# Altium footprint library TMDE_REV1.0.PcbLib: 94 footprints (part 5 of 6)
Each footprint in its own frame and in the unit in brackets; x right, y up, seen from the top. Pads: shape width x height; smd on the part's side, far side on the other; paste and mask are expansions set on the pad; w line width, h text height; cw(c..) or ccw(c..) is an arc to the next point about the centre after c.
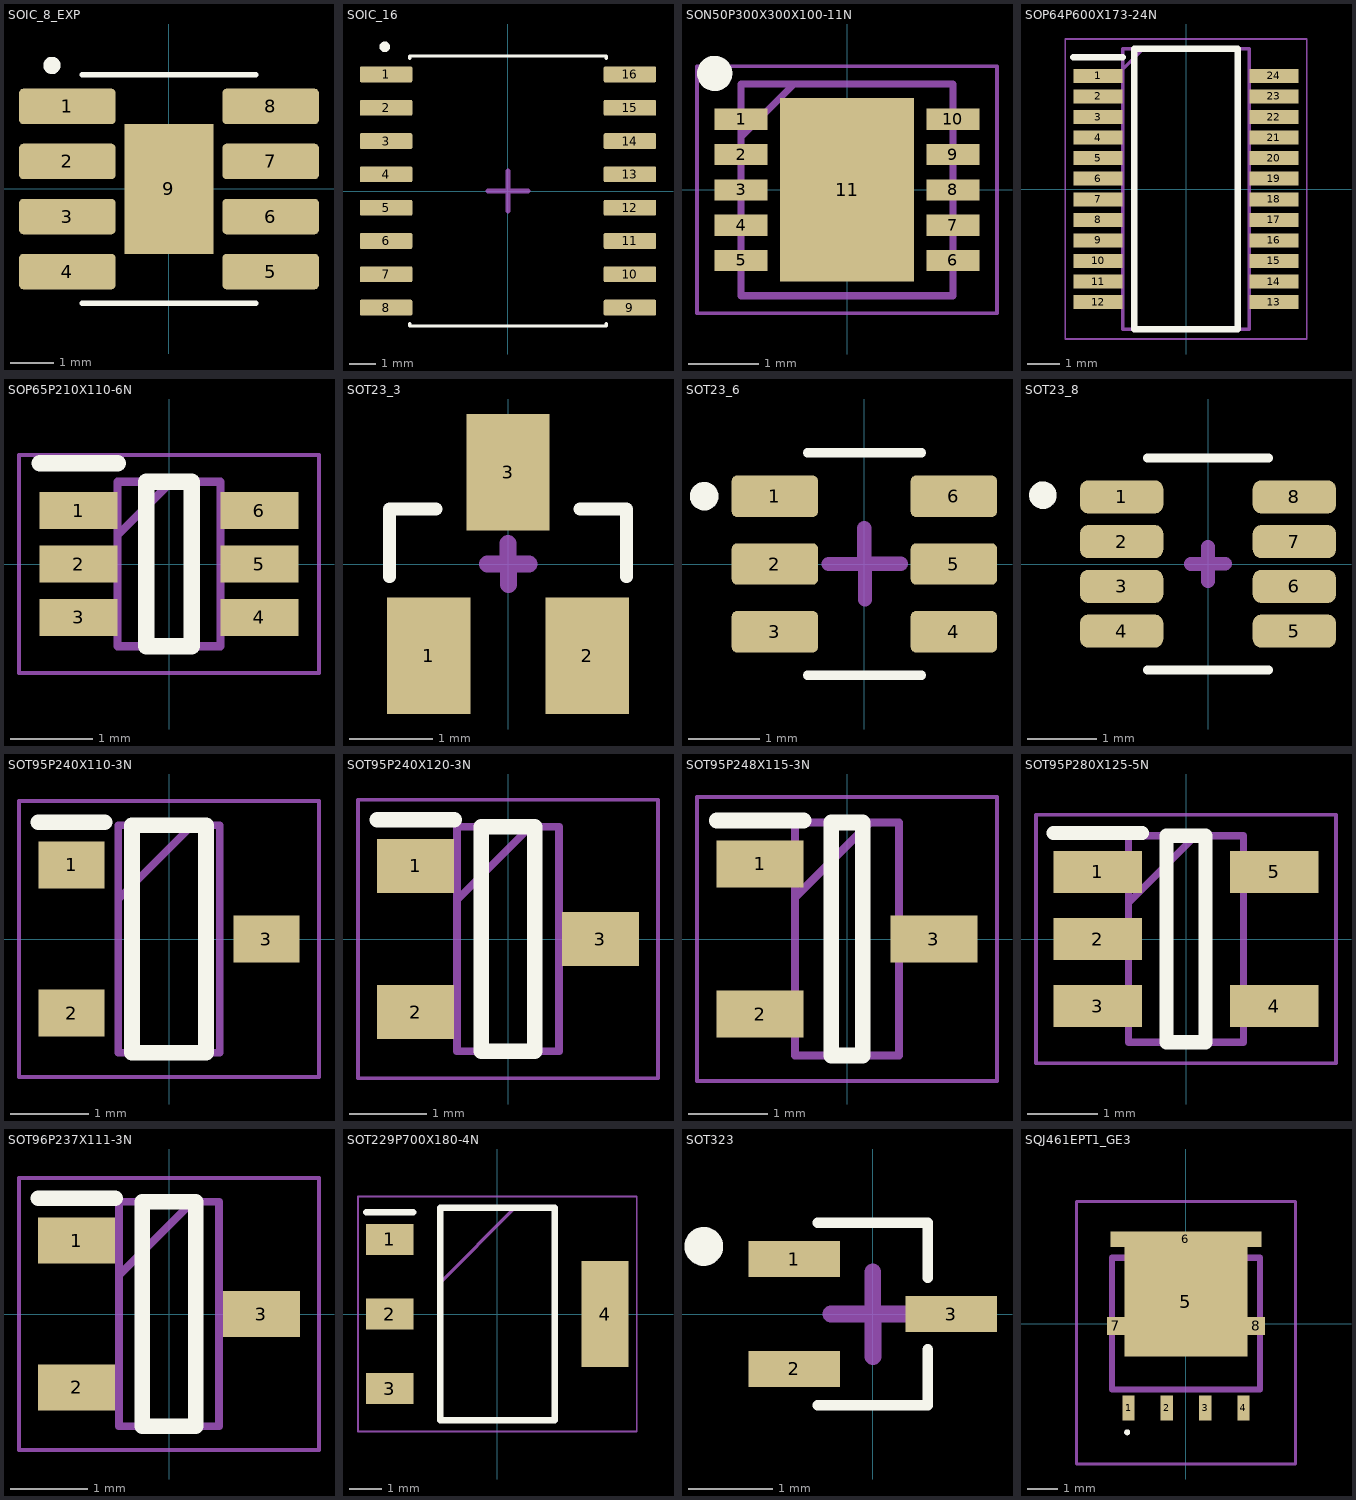
[diagram p4: the footprints below, top view; thin cyan lines are the x and y axes]

## SOIC_8_EXP [mm]
pads (9):
  rrect25% 2.23x0.82 smd: 1(-2.345,1.905) 2(-2.345,0.635) 3(-2.345,-0.635) 4(-2.345,-1.905) 5(2.345,-1.905) 6(2.345,-0.635) 7(2.345,0.635) 8(2.345,1.905)
  rect 2.06x3 smd paste-3: 9(0,0)
Top Overlay:
  circle w0.2: c-2.7,2.85 r0.1
  lines w0.127: -2,-2.635 2,-2.635 ; -2,2.635 2,2.635
Top Paste:
  region: 0.515,-0.75 -0.515,-0.75 -0.515,0.75 0.515,0.75
Mechanical 16:
  lines w0.254: -0.651,-0.007 -0.016,-0.007 -0.016,-0.642 ; -0.016,0.018 0.619,0.018 ; 0,0 0,0.635
3D body "IC8_AP64351SP-13_DIO.step": height 1.63, standoff -0.05, extent -3.073,-2.476 3.027,2.476

## SOIC_16 [mm]
pads (16):
  rrect17% 2x0.6 smd mask+0: 1(-4.65,4.445) 2(-4.65,3.175) 3(-4.65,1.905) 4(-4.65,0.635) 5(-4.65,-0.635) 6(-4.65,-1.905) 7(-4.65,-3.175) 8(-4.65,-4.445) 9(4.65,-4.445) 10(4.65,-3.175) 11(4.65,-1.905) 12(4.65,-0.635) 13(4.65,0.635) 14(4.65,1.905) 15(4.65,3.175) 16(4.65,4.445)
Top Overlay:
  circle w0.2: c-4.7,5.5 r0.1
  lines w0.127: -3.75,-5.065 -3.75,-5.15 3.75,-5.15 3.75,-5.065 ; -3.75,5.065 -3.75,5.15 3.75,5.15 3.75,5.065
Top Solder:
  drawing of 16 lines, arcs and shapes, not listed
Mechanical 16:
  lines w0.2: -0.75,0 0,0 ; 0,-0.75 0,0 ; 0,0.75 0,0 ; 0.75,0 0,0
3D body "step_temp.STEP": height 2.65, standoff 0, extent -5.15,-5.15 5.15,5.15

## SON50P300X300X100-11N [mm]
pads (11):
  rect 0.75x0.3 smd: 1(-1.5,1) 2(-1.5,0.5) 3(-1.5,0) 4(-1.5,-0.5) 5(-1.5,-1) 6(1.5,-1) 7(1.5,-0.5) 8(1.5,0) 9(1.5,0.5) 10(1.5,1)
  rect 1.9x2.6 smd: 11(0,0)
Top Overlay:
  circle w0.25: c-1.875,1.65 r0.125
Mechanical 13:
  lines w0.1: -1.5,0.75 -0.75,1.5 ; -1.5,-1.5 -1.5,1.5 1.5,1.5 1.5,-1.5 -1.5,-1.5
Mechanical 15:
  lines w0.05: -2.125,-1.75 -2.125,1.75 2.125,1.75 2.125,-1.75 -2.125,-1.75
3D body "NCP59744MN1ADJTBG.stp": height 1, standoff 0, extent -1.55,-1.5 1.55,1.5

## SOP64P600X173-24N [mm]
pads (24):
  rect 1.522x0.435 smd: 1(-2.714,3.492) 2(-2.714,2.858) 3(-2.714,2.222) 4(-2.714,1.588) 5(-2.714,0.952) 6(-2.714,0.318) 7(-2.714,-0.318) 8(-2.714,-0.952) 9(-2.714,-1.588) 10(-2.714,-2.222) 11(-2.714,-2.858) 12(-2.714,-3.492) 13(2.714,-3.492) 14(2.714,-2.858) 15(2.714,-2.222) 16(2.714,-1.588) 17(2.714,-0.952) 18(2.714,-0.318) 19(2.714,0.318) 20(2.714,0.952) 21(2.714,1.588) 22(2.714,2.222) 23(2.714,2.858) 24(2.714,3.492)
Top Overlay:
  lines w0.2: -3.475,4.06 -1.952,4.06 ; -1.602,-4.33 -1.602,4.33 1.602,4.33 1.602,-4.33 -1.602,-4.33
Mechanical 13:
  lines w0.1: -1.952,3.695 -1.318,4.33 ; -1.952,-4.33 -1.952,4.33 1.952,4.33 1.952,-4.33 -1.952,-4.33
Mechanical 15:
  lines w0.05: -3.725,-4.63 -3.725,4.63 3.725,4.63 3.725,-4.63 -3.725,-4.63
3D body "STP16CP05PTR.stp": height 1.73, standoff 0, extent -3,-4.33 3,4.33

## SOP65P210X110-6N [mm]
pads (6):
  rect 0.95x0.45 smd: 1(-1.1,0.65) 2(-1.1,0) 3(-1.1,-0.65) 4(1.1,-0.65) 5(1.1,0) 6(1.1,0.65)
Top Overlay:
  lines w0.2: -1.575,1.225 -0.625,1.225 ; -0.275,-1 0.275,-1 0.275,1 -0.275,1 -0.275,-1
Mechanical 13:
  lines w0.1: -0.625,0.35 0.025,1 ; -0.625,-1 0.625,-1 0.625,1 -0.625,1 -0.625,-1
Mechanical 15:
  lines w0.05: -1.825,-1.325 1.825,-1.325 1.825,1.325 -1.825,1.325 -1.825,-1.325
3D body "LM66100DCKR.stp": height 1, standoff 0, extent -1.05,-1 1.05,1

## SOT23_3 [mm]
pads (3):
  rect 1x1.4 smd: 1(-0.95,-1.1) 2(0.95,-1.1) 3(0,1.1)
Top Overlay:
  lines w0.152: -1.422,-0.152 -1.422,0.66 -0.864,0.66 ; 0.864,0.66 1.422,0.66 1.422,-0.152
Mechanical 16:
  lines w0.2: -0.25,0 0,0 0,0.25 ; 0.003,0.001 0.253,0.001 ; 0.006,-0.249 0.006,0.001
3D body "PESD5V0U2BT,215.STEP": height 1.1, standoff 0, extent -1.45,-1.3 1.45,1

## SOT23_6 [mm]
pads (6):
  rrect25% 1.21x0.58 smd: 1(-1.255,0.95) 2(-1.255,0) 3(-1.255,-0.95) 4(1.255,-0.95) 5(1.255,0) 6(1.255,0.95)
Top Overlay:
  circle w0.2: c-2.247,0.951 r0.1
  lines w0.127: -0.8,-1.56 0.8,-1.56 ; -0.8,1.56 0.8,1.56
Mechanical 16:
  lines w0.2: -0.5,0 0,0 0,0.5 ; 0.011,-0.496 0.011,0.004 0.511,0.004
3D body "step_temp.STEP": height 1.1, standoff 0, extent -1.375,-1.5 1.375,1.5

## SOT23_8 [mm]
pads (8):
  rrect50% 1.21x0.48 smd: 1(-1.255,0.975) 2(-1.255,0.325) 3(-1.255,-0.325) 4(-1.255,-0.975) 5(1.255,-0.975) 6(1.255,-0.325) 7(1.255,0.325) 8(1.255,0.975)
Top Overlay:
  circle w0.2: c-2.4,1 r0.1
  lines w0.127: -0.88,-1.54 0.88,-1.54 ; -0.88,1.54 0.88,1.54
Mechanical 16:
  lines w0.2: -0.25,-0.001 0,-0.001 0,0.25 ; 0,-0.248 0,0.002 ; 0,0.005 0.25,0.005
3D body "TLV3502AIDCNR.STEP": height 1.45, standoff 0, extent -1.45,-1.45 1.35,1.45

## SOT95P240X110-3N [mm]
pads (3):
  rect 0.85x0.6 smd: 1(-1.25,0.95) 2(-1.25,-0.95) 3(1.25,0)
Top Overlay:
  lines w0.2: -1.675,1.5 -0.825,1.5 ; -0.475,-1.46 0.475,-1.46 0.475,1.46 -0.475,1.46 -0.475,-1.46
Mechanical 13:
  lines w0.1: -0.65,0.51 0.3,1.46 ; -0.65,-1.46 0.65,-1.46 0.65,1.46 -0.65,1.46 -0.65,-1.46
Mechanical 15:
  lines w0.05: -1.925,-1.77 1.925,-1.77 1.925,1.77 -1.925,1.77 -1.925,-1.77
3D body "BZX84B18.stp": height 1, standoff 0, extent -1.2,-1.46 1.2,1.46

## SOT95P240X120-3N [mm]
pads (3):
  rect 1x0.7 smd: 1(-1.2,0.95) 2(-1.2,-0.95) 3(1.2,0)
Top Overlay:
  lines w0.2: -1.7,1.55 -0.7,1.55 ; -0.35,-1.46 0.35,-1.46 0.35,1.46 -0.35,1.46 -0.35,-1.46
Mechanical 13:
  lines w0.1: -0.662,0.51 0.288,1.46 ; -0.662,-1.46 0.662,-1.46 0.662,1.46 -0.662,1.46 -0.662,-1.46
Mechanical 15:
  lines w0.05: -1.95,-1.81 1.95,-1.81 1.95,1.81 -1.95,1.81 -1.95,-1.81
3D body "BZX84C15.stp": height 1.2, standoff 0, extent -1.2,-1.46 1.2,1.46

## SOT95P248X115-3N [mm]
pads (3):
  rect 1.1x0.6 smd: 1(-1.1,0.95) 2(-1.1,-0.95) 3(1.1,0)
Top Overlay:
  lines w0.2: -1.65,1.5 -0.55,1.5 ; -0.2,-1.475 0.2,-1.475 0.2,1.475 -0.2,1.475 -0.2,-1.475
Mechanical 13:
  lines w0.1: -0.658,0.525 0.292,1.475 ; -0.658,-1.475 0.658,-1.475 0.658,1.475 -0.658,1.475 -0.658,-1.475
Mechanical 15:
  lines w0.05: -1.9,-1.8 1.9,-1.8 1.9,1.8 -1.9,1.8 -1.9,-1.8
3D body "BZX84B9V1-E3-08.stp": height 1.15, standoff 0, extent -1.238,-1.475 1.238,1.475

## SOT95P280X125-5N [mm]
pads (5):
  rect 1.25x0.6 smd: 1(-1.25,0.95) 2(-1.25,0) 3(-1.25,-0.95) 4(1.25,-0.95) 5(1.25,0.95)
Top Overlay:
  lines w0.2: -1.875,1.5 -0.625,1.5 ; -0.275,-1.463 0.275,-1.463 0.275,1.463 -0.275,1.463 -0.275,-1.463
Mechanical 13:
  lines w0.1: -0.813,0.513 0.137,1.463 ; -0.813,-1.463 0.813,-1.463 0.813,1.463 -0.813,1.463 -0.813,-1.463
Mechanical 15:
  lines w0.05: -2.125,-1.763 2.125,-1.763 2.125,1.763 -2.125,1.763 -2.125,-1.763
3D body "DIO7002AST5.stp": height 1.25, standoff 0, extent -1.4,-1.463 1.4,1.463

## SOT96P237X111-3N [mm]
pads (3):
  rect 1x0.6 smd: 1(-1.2,0.955) 2(-1.2,-0.955) 3(1.2,0)
Top Overlay:
  lines w0.2: -1.7,1.505 -0.7,1.505 ; -0.35,-1.46 -0.35,1.46 0.35,1.46 0.35,-1.46 -0.35,-1.46
Mechanical 13:
  lines w0.1: -0.65,0.505 0.305,1.46 ; -0.65,-1.46 -0.65,1.46 0.65,1.46 0.65,-1.46 -0.65,-1.46
Mechanical 15:
  lines w0.05: -1.95,-1.77 -1.95,1.77 1.95,1.77 1.95,-1.77 -1.95,-1.77
3D body "BZX84C3V3LT1G.stp": height 1.11, standoff 0, extent -1.185,-1.46 1.185,1.46

## SOT229P700X180-4N [mm]
pads (4):
  rect 1.45x0.95 smd: 1(-3.3,2.29) 2(-3.3,0) 3(-3.3,-2.29)
  rect 1.45x3.25 smd: 4(3.3,0)
Top Overlay:
  lines w0.2: -4.025,3.115 -2.575,3.115 ; -1.752,-3.252 1.752,-3.252 1.752,3.252 -1.752,3.252 -1.752,-3.252
Mechanical 13:
  lines w0.1: -1.752,0.962 0.538,3.252 ; -1.752,-3.252 1.752,-3.252 1.752,3.252 -1.752,3.252 -1.752,-3.252
Mechanical 15:
  lines w0.05: -4.275,-3.605 4.275,-3.605 4.275,3.605 -4.275,3.605 -4.275,-3.605
3D body "AMS1117-3.3.stp": height 1.8, standoff 0, extent -3.355,-3.15 3.355,3.15

## SOT323 [mm]
pads (3):
  rect 1.08x0.43 smd: 1(-0.93,0.65) 2(-0.93,-0.65) 3(0.93,0)
Top Overlay:
  circle w0.3: c-2,0.8 r0.08
  lines w0.127: -0.65,-1.08 0.65,-1.08 0.65,-0.42 ; -0.65,1.08 0.65,1.08 0.65,0.43
Mechanical 16:
  lines w0.2: -0.497,-0.001 0.003,-0.001 ; 0,0 0,0.5 ; 0.001,-0.501 0.001,-0.001 0.501,-0.001
3D body "step_temp.STEP": height 1.1, standoff 0, extent -1.05,-1.075 1.05,1.075

## SQJ461EPT1_GE3 [mm]
pads (8):
  rect 0.41x0.82 smd: 1(-1.905,-2.792) 2(-0.635,-2.792) 3(0.635,-2.792) 4(1.905,-2.792)
  rect 4.061x3.63 smd: 5(0,0.724)
  rect 5x0.51 smd: 6(0,2.792)
  rect 0.595x0.61 smd: 7(-2.328,-0.076) 8(2.328,-0.076)
Top Overlay:
  lines w0.1: -2,-3.6 cw(c-1.95,-3.6) -1.9,-3.6 cw(c-1.95,-3.6) -2,-3.6
Mechanical 13:
  lines w0.2: -2.45,-2.185 -2.45,2.185 2.45,2.185 2.45,-2.185 -2.45,-2.185
Mechanical 15:
  lines w0.1: -3.625,-4.65 -3.625,4.048 3.626,4.048 3.626,-4.65 -3.625,-4.65